# Altium footprint library Dlib.PcbLib: 70 footprints (part 5 of 5)
Each footprint in its own frame and in the unit in brackets; x right, y up, seen from the top. Pads: shape width x height; smd on the part's side, far side on the other; paste and mask are expansions set on the pad; w line width, h text height; cw(c..) or ccw(c..) is an arc to the next point about the centre after c.
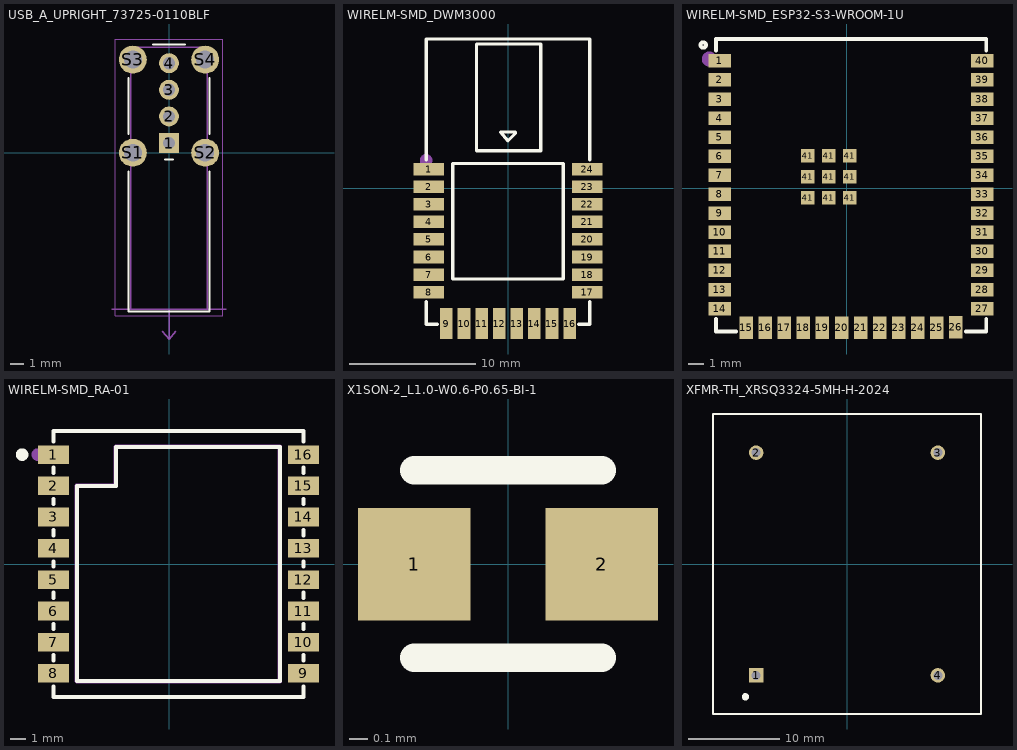
[diagram p4: the footprints below, top view; thin cyan lines are the x and y axes]

## USB_A_UPRIGHT_73725-0110BLF [mm]
pads (8):
  rect 1.5x1.5 hole 0.92 paste-2539.97 mask+0.05: 1(0,0.73)
  round 1.5 hole 0.92 paste-2539.97 mask+0.05: 2(0,2.73) 3(0,4.73) 4(0,6.73)
  round 2.1 hole 1.35 paste-2539.97 mask+0.05: S1(-2.72,0) S2(2.72,0) S3(-2.72,7) S4(2.72,7)
Top Overlay:
  lines w0.15: -3.05,-1.4 -3.05,-11.93 3.05,-11.93 3.05,-1.4 ; -3.05,1.4 -3.05,5.6 ; -1.2,8.12 1.2,8.12 ; -0.3,-0.5 0.3,-0.5 ; 3.05,1.4 3.05,5.6
Mechanical 1:
  lines w0.1: -2.88,-11.76 2.88,-11.76 2.88,7.94 -2.88,7.94 -2.88,-11.76
Mechanical 13:
  lines w0.1: -4.3,-11.76 4.3,-11.76 ; -0.5,-13.4 0,-14 ; 0,-11.76 0,-14 ; 0.5,-13.4 0,-14
Mechanical 15:
  lines w0.05: -4.05,-12.26 4.05,-12.26 4.05,8.55 -4.05,8.55 -4.05,-12.26
3D body "73725-0110BLF-aligned.step": height 14.53, standoff -3.28, extent -3.57,-11.79 3.55,7.91

## WIRELM-SMD_DWM3000 [mm]
pads (24):
  rect 2.45x1 smd paste+0 mask+0.051: 1(-6.304,1.523) 2(-6.304,0.123) 3(-6.304,-1.277) 4(-6.304,-2.677) 5(-6.304,-4.077) 6(-6.304,-5.477) 7(-6.304,-6.877) 8(-6.304,-8.277) 17(6.304,-8.277) 18(6.304,-6.877) 19(6.304,-5.477) 20(6.304,-4.077) 21(6.304,-2.677) 22(6.304,-1.277) 23(6.304,0.123) 24(6.304,1.523)
  rect 1x2.45 smd paste+0 mask+0.051: 9(-4.901,-10.776) 10(-3.501,-10.776) 11(-2.101,-10.776) 12(-0.701,-10.776) 13(0.699,-10.776) 14(2.099,-10.776) 15(3.499,-10.776) 16(4.899,-10.776)
Top Overlay:
  lines w0.254: -6.5,-9.008 -6.5,-10.826 -5.632,-10.826 ; -6.5,2.254 -6.5,11.874 6.5,11.874 6.5,2.254 ; 5.63,-10.826 6.5,-10.826 6.5,-9.008 ; -4.4,-7.226 4.4,-7.226 4.4,1.974 -4.4,1.974 -4.4,-7.226 ; -2.5,2.973 2.6,2.973 2.6,11.474 -2.5,11.474 -2.5,2.973 ; -0.6,4.473 0.599,4.473 0.599,4.373 0,3.774 -0.6,4.473
Mechanical 15:
  circle w0.5: c-6.52,2.22 r0.25
3D body "DWM3000TR13--3DModel-STEP-56544.STEP": height 2.89, standoff 0, extent -6.525,-10.74 6.475,11.96

## WIRELM-SMD_ESP32-S3-WROOM-1U [mm]
pads (49):
  rect 1.5x0.9 smd paste+0 mask+0.05: 1(-8.481,8.476) 2(-8.481,7.206) 3(-8.481,5.936) 4(-8.481,4.666) 5(-8.481,3.396) 6(-8.481,2.126) 7(-8.481,0.856) 8(-8.481,-0.414) 9(-8.481,-1.684) 10(-8.481,-2.954) 11(-8.481,-4.224) 12(-8.481,-5.494) 13(-8.481,-6.764) 14(-8.481,-8.034) 27(9.019,-8.034) 28(9.019,-6.764) 29(9.019,-5.494) 30(9.019,-4.224) 31(9.019,-2.954) 32(9.019,-1.684) 33(9.019,-0.414) 34(9.019,0.856) 35(9.019,2.126) 36(9.019,3.396) 37(9.019,4.666) 38(9.019,5.936) 39(9.019,7.206) 40(9.019,8.476)
  rect 0.9x1.5 smd paste+0 mask+0.05: 15(-6.716,-9.314) 16(-5.446,-9.314) 17(-4.176,-9.314) 18(-2.906,-9.314) 19(-1.636,-9.314) 20(-0.366,-9.314) 21(0.904,-9.314) 22(2.174,-9.314) 23(3.444,-9.314) 24(4.714,-9.314) 25(5.984,-9.314) 26(7.254,-9.284)
  rect 0.9x0.9 smd paste+0 mask+0.051: 41(-2.631,-0.644) 41(-2.631,0.756) 41(-2.631,2.156) 41(-1.231,-0.644) 41(-1.231,0.756) 41(-1.231,2.156) 41(0.169,-0.644) 41(0.169,0.756) 41(0.169,2.156)
Top Overlay:
  circle w0.254: c-9.586,9.536 r0.183
  lines w0.254: -8.731,-8.715 -8.731,-9.563 -7.397,-9.563 ; -8.731,9.157 -8.731,9.936 9.286,9.936 9.286,9.157 ; 7.935,-9.563 9.286,-9.563 9.286,-8.715
Mechanical 15:
  circle w0.5: c-9.181,8.6 r0.25

## WIRELM-SMD_RA-01 [mm]
pads (16):
  rect 1.999x1.199 smd paste+0 mask+0.051: 1(-7.4,7) 2(-7.4,5) 3(-7.4,3.01) 4(-7.4,1.003) 5(-7.4,-1.003) 6(-7.4,-3.01) 7(-7.4,-5) 8(-7.4,-7) 9(8.6,-7) 10(8.6,-5) 11(8.6,-3.01) 12(8.6,-1.003) 13(8.6,1.003) 14(8.6,3.01) 15(8.6,5) 16(8.6,7)
Top Overlay:
  circle w0.4: c-9.4,7 r0.2
  lines w0.254: -7.4,-7.831 -7.4,-8.5 8.6,-8.5 8.6,-7.831 ; -7.4,-6.169 -7.4,-5.831 ; -7.4,-4.169 -7.4,-3.84 ; -7.4,-2.179 -7.4,-1.834 ; -7.4,-0.173 -7.4,0.172 ; -7.4,1.834 -7.4,2.179 ; -7.4,3.84 -7.4,4.169 ; -7.4,5.831 -7.4,6.169 ; -7.4,7.831 -7.4,8.5 8.6,8.5 8.6,7.831 ; 8.6,-6.169 8.6,-5.831 ; 8.6,-4.169 8.6,-3.84 ; 8.6,-2.179 8.6,-1.834 ; 8.6,-0.173 8.6,0.173 ; 8.6,1.834 8.6,2.179 ; 8.6,3.84 8.6,4.169 ; 8.6,5.831 8.6,6.169 ; -5.9,-7.5 -5.9,5 -3.4,5 -3.4,7.5 7.1,7.5 7.1,-7.5 -5.9,-7.5
Mechanical 15:
  circle w0.4: c-8.4,7 r0.2
  region: -5.773,5 -5.773,-7.373 6.973,-7.373 6.973,7.373 -3.273,7.373 -3.273,5 -3.273,4.947 -3.347,4.873 -3.452,4.873 -3.527,4.947 -3.527,5 -3.527,7.5 -3.527,7.525 -3.507,7.572 -3.472,7.608 -3.425,7.627 -3.4,7.627 7.1,7.627 7.125,7.627 7.172,7.608 7.208,7.572 7.227,7.525 7.227,7.5 7.227,-7.5 7.227,-7.525 7.208,-7.572 7.172,-7.608 7.125,-7.627 7.1,-7.627 -5.9,-7.627 -5.925,-7.627 -5.972,-7.608 -6.007,-7.572 -6.027,-7.525 -6.027,-7.5 -6.027,5 -6.027,5.053 -5.952,5.127 -5.847,5.127 -5.773,5.053
  region: -3.4,4.873 -5.9,4.873 -5.952,4.873 -6.027,4.947 -6.027,5.053 -5.952,5.127 -5.9,5.127 -3.4,5.127 -3.347,5.127 -3.273,5.053 -3.273,4.947 -3.347,4.873
3D body "RA-01H--3DModel-STEP-1.STEP": height 3.4, standoff 0, extent -7.441,-8.534 8.559,8.466

## X1SON-2_L1.0-W0.6-P0.65-BI-1 [mm]
pads (2):
  rect 0.6x0.6 smd: 1(-0.5,0) 2(0.5,0)
Top Overlay:
  lines w0.15: -0.5,-0.5 0.5,-0.5 ; -0.5,0.5 0.5,0.5
3D body "C48260.step": height 0.39, standoff 0, extent -0.51,-0.31 0.51,0.31

## XFMR-TH_XRSQ3324-5MH-H-2024 [mm]
pads (4):
  rect 1.6x1.6 hole 1 paste-2539.97 mask+0.05: 1(-10,-12.25)
  round 1.6 hole 1 paste-2539.97 mask+0.05: 2(-10,12.25) 3(10,12.25) 4(10,-12.25)
Top Overlay:
  circle w0.4: c-11.176,-14.605 r0.2
  lines w0.254: -14.75,-16.5 -14.75,16.5 14.75,16.5 14.75,-16.5 -14.75,-16.5